# Altium footprint library Connectors.PcbLib: 305 footprints (part 20 of 20)
Each footprint in its own frame and in the unit in brackets; x right, y up, seen from the top. Pads: shape width x height; smd on the part's side, far side on the other; paste and mask are expansions set on the pad; w line width, h text height; cw(c..) or ccw(c..) is an arc to the next point about the centre after c.
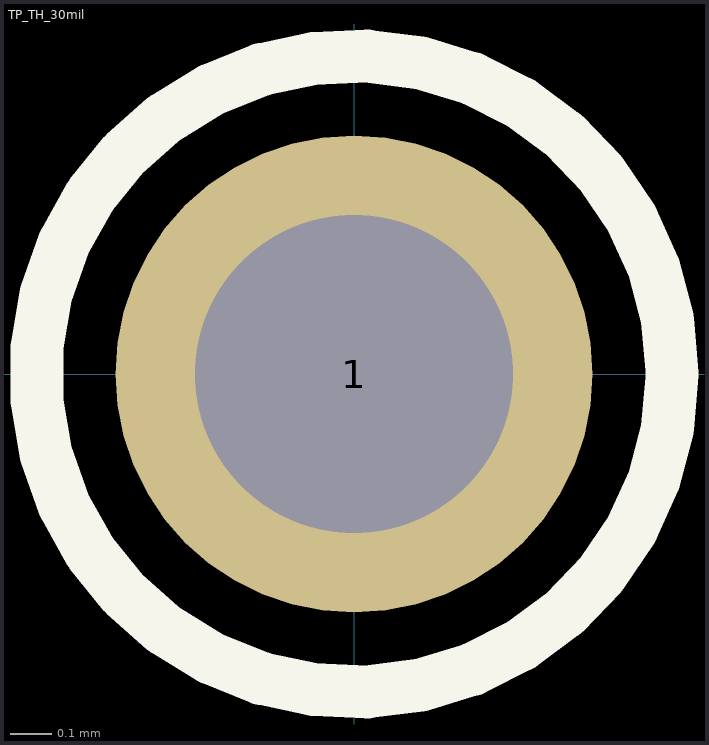
[diagram p19: the footprint, top view; thin cyan lines are the x and y axes]

## TP_TH_30mil [mil] "/ 20190222 / C-A.Serna.A"
pads (1):
  round 45 hole 30: 1(0,0)
Top Overlay:
  circle w5: c0,0 r30
Bottom Overlay:
  circle w5: c0,0 r30